# Altium footprint library 轻触开关.PcbLib: 62 footprints (part 4 of 4)
Each footprint in its own frame and in the unit in brackets; x right, y up, seen from the top. Pads: shape width x height; smd on the part's side, far side on the other; paste and mask are expansions set on the pad; w line width, h text height; cw(c..) or ccw(c..) is an arc to the next point about the centre after c.
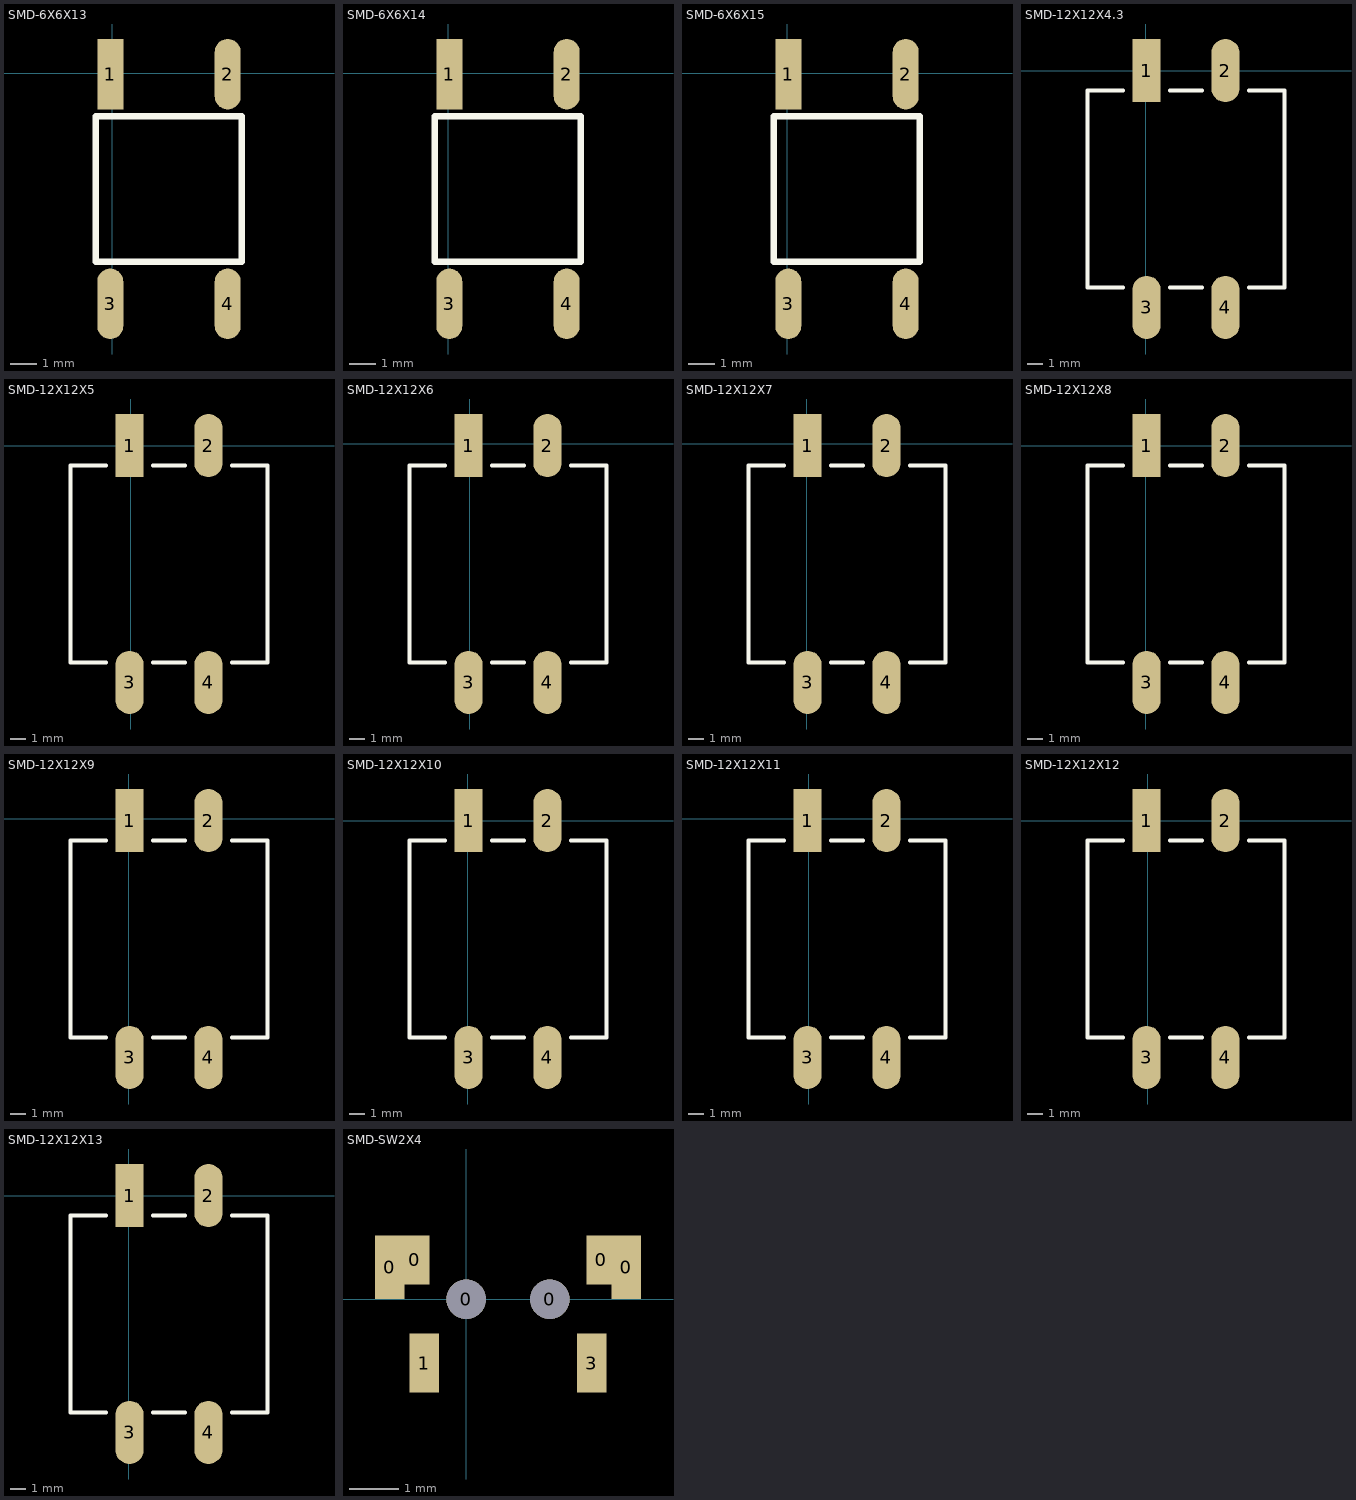
[diagram p3: the footprints below, top view; thin cyan lines are the x and y axes]

## SMD-6X6X13 [mm] "6*6*13mm"
pads (4):
  rect 1x2.7 smd: 1(-0.08,-0.045)
  oval 1x2.7 smd: 2(4.42,-0.045) 3(-0.08,-8.845) 4(4.42,-8.845)
Top Overlay:
  lines w0.254: -0.635,-7.239 -0.635,-1.651 4.953,-1.651 4.953,-7.239 -0.635,-7.239
3D body "SMD-6X6X13.STEP": height 12.95, standoff -0.03, extent -0.793,-8.818 5.207,0.182

## SMD-6X6X14 [mm]
pads (4):
  rect 1x2.7 smd: 1(0.047,-0.045)
  oval 1x2.7 smd: 2(4.547,-0.045) 3(0.047,-8.845) 4(4.547,-8.845)
Top Overlay:
  lines w0.254: -0.508,-7.239 5.08,-7.239 5.08,-1.651 -0.508,-1.651 -0.508,-7.239
3D body "SMD-6X6X14.STEP": height 13.95, standoff -0.03, extent -0.666,-8.818 5.334,0.182

## SMD-6X6X15 [mm]
pads (4):
  rect 1x2.7 smd: 1(0.047,-0.045)
  oval 1x2.7 smd: 2(4.547,-0.045) 3(0.047,-8.845) 4(4.547,-8.845)
Top Overlay:
  lines w0.254: -0.508,-7.239 5.08,-7.239 5.08,-1.651 -0.508,-1.651 -0.508,-7.239
3D body "SMD-6X6X15.STEP": height 14.95, standoff -0.03, extent -0.762,-8.818 5.238,0.182

## SMD-12X12X4.3 [mm]
pads (4):
  rect 1.8x4 smd: 1(0.04,0.007)
  oval 1.8x4 smd: 2(5.04,0.007) 3(0.04,-14.993) 4(5.04,-14.993)
Top Overlay:
  lines w0.254: -1.46,-13.743 -3.71,-13.743 -3.71,-1.243 -1.46,-1.243 ; 1.54,-13.743 3.54,-13.743 ; 1.54,-1.243 3.54,-1.243 ; 6.54,-13.743 8.79,-13.743 8.79,-1.243 6.54,-1.243
3D body "SMD-12X12X4.3.STEP": height 4.45, standoff 0, extent -3.429,-14.839 8.571,0.361

## SMD-12X12X5 [mm]
pads (4):
  rect 1.8x4 smd: 1(-0.087,0.007)
  oval 1.8x4 smd: 2(4.913,0.007) 3(-0.087,-14.993) 4(4.913,-14.993)
Top Overlay:
  lines w0.254: -1.587,-13.743 -3.837,-13.743 -3.837,-1.243 -1.587,-1.243 ; 1.413,-13.743 3.413,-13.743 ; 1.413,-1.243 3.413,-1.243 ; 6.413,-13.743 8.663,-13.743 8.663,-1.243 6.413,-1.243
3D body "SMD-12X12X5.STEP": height 5.15, standoff 0, extent -3.683,-14.966 8.317,0.234

## SMD-12X12X6 [mm]
pads (4):
  rect 1.8x4 smd: 1(-0.087,-0.12)
  oval 1.8x4 smd: 2(4.913,-0.12) 3(-0.087,-15.12) 4(4.913,-15.12)
Top Overlay:
  lines w0.254: -1.587,-13.87 -3.837,-13.87 -3.837,-1.37 -1.587,-1.37 ; 1.413,-13.87 3.413,-13.87 ; 1.413,-1.37 3.413,-1.37 ; 6.413,-13.87 8.663,-13.87 8.663,-1.37 6.413,-1.37
3D body "SMD-12X12X6.STEP": height 6.15, standoff 0, extent -3.714,-15.113 8.286,0.087

## SMD-12X12X7 [mm]
pads (4):
  rect 1.8x4 smd: 1(0.04,-0.12)
  oval 1.8x4 smd: 2(5.04,-0.12) 3(0.04,-15.12) 4(5.04,-15.12)
Top Overlay:
  lines w0.254: -1.46,-13.87 -3.71,-13.87 -3.71,-1.37 -1.46,-1.37 ; 1.54,-13.87 3.54,-13.87 ; 1.54,-1.37 3.54,-1.37 ; 6.54,-13.87 8.79,-13.87 8.79,-1.37 6.54,-1.37
3D body "SMD-12X12X7.STEP": height 7.15, standoff 0, extent -3.587,-15.113 8.413,0.087

## SMD-12X12X8 [mm] "12*12*8mm"
pads (4):
  rect 1.8x4 smd: 1(0.04,0.007)
  oval 1.8x4 smd: 2(5.04,0.007) 3(0.04,-14.993) 4(5.04,-14.993)
Top Overlay:
  lines w0.254: -1.46,-13.743 -3.71,-13.743 -3.71,-1.243 -1.46,-1.243 ; 1.54,-13.743 3.54,-13.743 ; 1.54,-1.243 3.54,-1.243 ; 6.54,-13.743 8.79,-13.743 8.79,-1.243 6.54,-1.243
3D body "SMD-12X12X8.STEP": height 8.15, standoff 0, extent -3.714,-14.859 8.286,0.341

## SMD-12X12X9 [mm]
pads (4):
  rect 1.8x4 smd: 1(0.04,-0.12)
  oval 1.8x4 smd: 2(5.04,-0.12) 3(0.04,-15.12) 4(5.04,-15.12)
Top Overlay:
  lines w0.254: -1.46,-13.87 -3.71,-13.87 -3.71,-1.37 -1.46,-1.37 ; 1.54,-13.87 3.54,-13.87 ; 1.54,-1.37 3.54,-1.37 ; 6.54,-13.87 8.79,-13.87 8.79,-1.37 6.54,-1.37
3D body "SMD-12X12X9.STEP": height 9.15, standoff 0, extent -3.491,-15.22 8.509,-0.02

## SMD-12X12X10 [mm]
pads (4):
  rect 1.8x4 smd: 1(0.04,0.007)
  oval 1.8x4 smd: 2(5.04,0.007) 3(0.04,-14.993) 4(5.04,-14.993)
Top Overlay:
  lines w0.254: -1.46,-13.743 -3.71,-13.743 -3.71,-1.243 -1.46,-1.243 ; 1.54,-13.743 3.54,-13.743 ; 1.54,-1.243 3.54,-1.243 ; 6.54,-13.743 8.79,-13.743 8.79,-1.243 6.54,-1.243
3D body "SMD-12X12X10.STEP": height 10.15, standoff 0, extent -3.491,-14.966 8.509,0.234

## SMD-12X12X11 [mm]
pads (4):
  rect 1.8x4 smd: 1(-0.087,-0.12)
  oval 1.8x4 smd: 2(4.913,-0.12) 3(-0.087,-15.12) 4(4.913,-15.12)
Top Overlay:
  lines w0.254: -1.587,-13.87 -3.837,-13.87 -3.837,-1.37 -1.587,-1.37 ; 1.413,-13.87 3.413,-13.87 ; 1.413,-1.37 3.413,-1.37 ; 6.413,-13.87 8.663,-13.87 8.663,-1.37 6.413,-1.37
3D body "SMD-12X12X11.STEP": height 11.15, standoff 0, extent -3.683,-15.22 8.317,-0.02

## SMD-12X12X12 [mm] "12*12*12mm"
pads (4):
  rect 1.8x4 smd: 1(-0.087,0.007)
  oval 1.8x4 smd: 2(4.913,0.007) 3(-0.087,-14.993) 4(4.913,-14.993)
Top Overlay:
  lines w0.254: -1.587,-13.743 -3.837,-13.743 -3.837,-1.243 -1.587,-1.243 ; 1.413,-13.743 3.413,-13.743 ; 1.413,-1.243 3.413,-1.243 ; 6.413,-13.743 8.663,-13.743 8.663,-1.243 6.413,-1.243
3D body "SMD-12X12X12.STEP": height 12.15, standoff 0, extent -3.683,-14.966 8.317,0.234

## SMD-12X12X13 [mm]
pads (4):
  rect 1.8x4 smd: 1(0.04,0.007)
  oval 1.8x4 smd: 2(5.04,0.007) 3(0.04,-14.993) 4(5.04,-14.993)
Top Overlay:
  lines w0.254: -1.46,-13.743 -3.71,-13.743 -3.71,-1.243 -1.46,-1.243 ; 1.54,-13.743 3.54,-13.743 ; 1.54,-1.243 3.54,-1.243 ; 6.54,-13.743 8.79,-13.743 8.79,-1.243 6.54,-1.243
3D body "SMD-12X12X13.STEP": height 13.15, standoff 0, extent -3.429,-14.966 8.571,0.234

## SMD-SW2X4 [mm]
pads (8):
  rect 0.6x1.3 smd: 0(-1.55,0.65) 0(3.25,0.65)
  rect 0.6x1 smd: 0(-1.05,0.8) 0(2.75,0.8)
  round 0.8 hole 0.8: 0(0,0) 0(1.7,0)
  rect 0.6x1.2 smd: 1(-0.85,-1.3) 3(2.55,-1.3)
3D body "User Library-it-1188e.STEP": height 3.5, standoff -0.7, extent -2.974,-1.8 4.826,1.8